# Altium footprint library FanARGB_Parts.PcbLib: 21 footprints (part 2 of 2)
Each footprint in its own frame and in the unit in brackets; x right, y up, seen from the top. Pads: shape width x height; smd on the part's side, far side on the other; paste and mask are expansions set on the pad; w line width, h text height; cw(c..) or ccw(c..) is an arc to the next point about the centre after c.
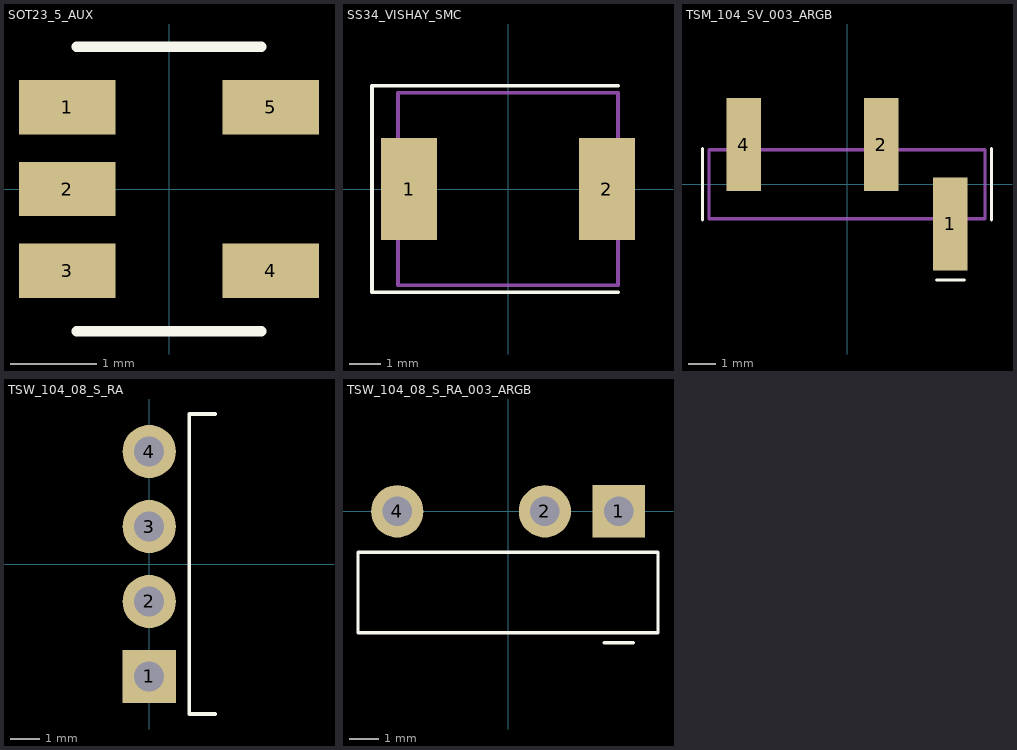
[diagram p1: the footprints below, top view; thin cyan lines are the x and y axes]

## SOT23_5_AUX [mm] "Microchip 5-lead SOT-23"
pads (5):
  rect 1.12x0.63 smd: 1(-1.18,0.95) 2(-1.18,0) 3(-1.18,-0.95) 4(1.18,-0.95) 5(1.18,0.95)
Top Overlay:
  lines w0.12: -1.07,-1.65 1.07,-1.65 ; -1.07,1.65 1.07,1.65
3D body "SOT23_5.step": height 1.19, standoff 0.02, extent -1.44,-1.46 1.44,1.46

## SS34_VISHAY_SMC [mm] "Vishay SS34 DO-214AB (SMC); cathode pad 1"
height 2.62
pads (2):
  rect 1.8x3.3 smd: 1(-3.2,0) 2(3.2,0)
Top Overlay:
  lines w0.12: 3.555,-3.34 -4.4,-3.34 -4.4,3.34 3.555,3.34
Mechanical 1:
  lines w0.12: -3.555,-3.11 -3.555,3.11 3.555,3.11 3.555,-3.11 -3.555,-3.11
3D body "SMC.step": height 2.31, standoff 0, extent -4,-2.95 4,2.95

## TSM_104_SV_003_ARGB [mm] "Samtec TSM-104-01-L-SV-003 SMT, pin 3 omitted; ARGB 1=5V 2=DATA 4=GND"
height 8.35
pads (3):
  rect 1.27x3.43 smd: 1(3.81,-1.46) 2(1.27,1.46) 4(-3.81,1.46)
Top Overlay:
  lines w0.12: -5.32,-1.31 -5.32,1.31 ; 3.3,-3.52 4.32,-3.52 ; 5.32,-1.31 5.32,1.31
Mechanical 1:
  lines w0.12: -5.08,-1.27 -5.08,1.27 5.08,1.27 5.08,-1.27 -5.08,-1.27
3D body "Samtec_ARGB.step": height 8.35, standoff 0, extent -5.08,-3.06 5.08,3.06

## TSW_104_08_S_RA [mm] "Samtec TSW-104-08-T-S-RA, horizontal mating 1x4, pitch 2.54 mm"
pads (4):
  rect 1.8x1.8 hole 1.016: 1(0,-3.81)
  round 1.8 hole 1.016: 2(0,-1.27) 3(0,1.27) 4(0,3.81)
Top Overlay:
  lines w0.12: 2.24,-5.08 1.36,-5.08 1.36,5.08 2.24,5.08
3D body "TSW_104_08_T_S_RA.step": height 3.02, standoff -2.29, extent -0.318,-5.08 9.9,5.08

## TSW_104_08_S_RA_003_ARGB [mm] "Samtec TSW-104-08-L-S-RA-003, ARGB 1 / 2 / gap / 4"
pads (3):
  rect 1.8x1.8 hole 1.016: 1(3.81,0)
  round 1.8 hole 1.016: 2(1.27,0) 4(-3.81,0)
Top Overlay:
  lines w0.12: 3.31,-4.52 4.31,-4.52 ; -5.16,-4.17 5.16,-4.17 5.16,-1.4 -5.16,-1.4 -5.16,-4.17
3D body "TSW_104_08_S_RA_003.step": height 3.02, standoff -2.29, extent -5.08,-9.9 5.08,0.32